# Altium footprint library iMX6 Rex Development Baseboard V1I1_PCB.PcbLib: 77 footprints (part 3 of 5)
Each footprint in its own frame and in the unit in brackets; x right, y up, seen from the top. Pads: shape width x height; smd on the part's side, far side on the other; paste and mask are expansions set on the pad; w line width, h text height; cw(c..) or ccw(c..) is an arc to the next point about the centre after c.
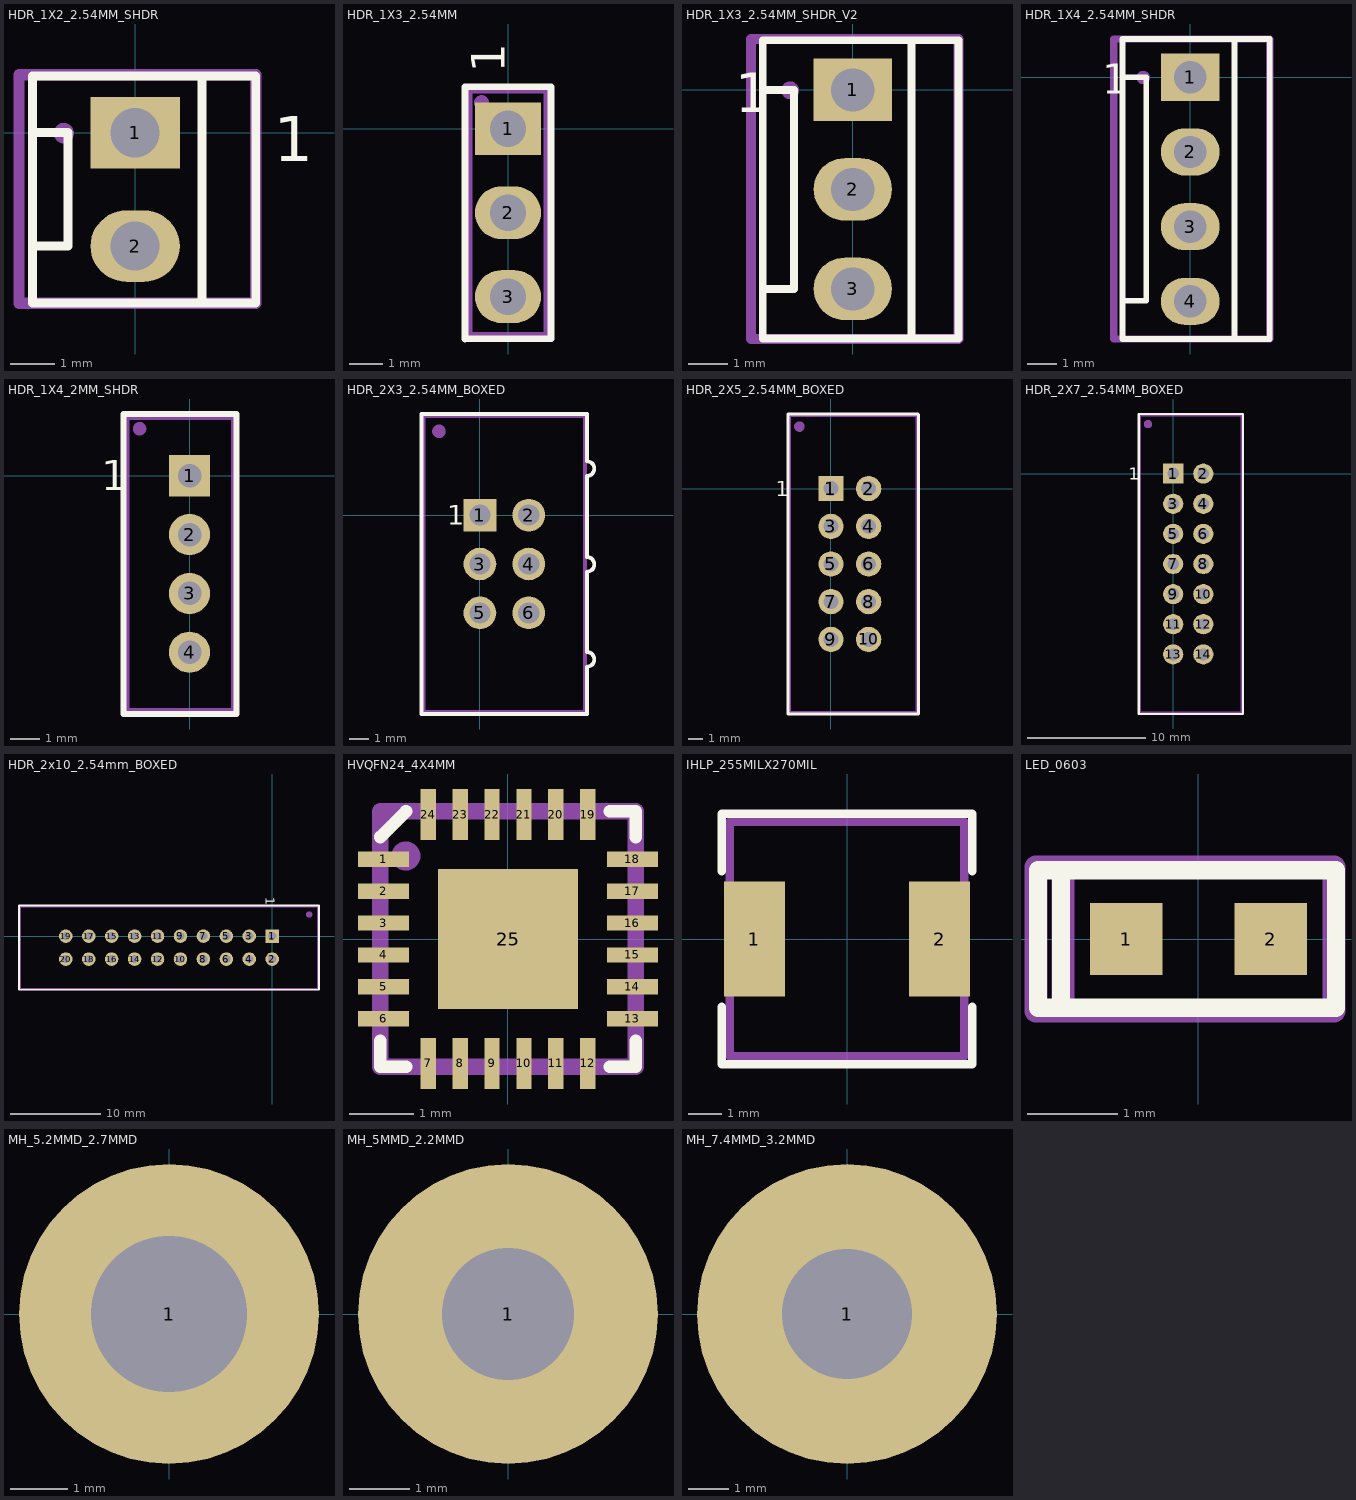
[diagram p2: the footprints below, top view; thin cyan lines are the x and y axes]

## HDR_1X2_2.54MM_SHDR [mm]
pads (2):
  rect 2x1.6 hole 1.1: 1(0,0)
  oval 2x1.6 hole 1.1: 2(0,-2.54)
Top Overlay:
  lines w0.2: -2.3,-2.54 -1.5,-2.54 -1.5,0 -2.3,0 ; 1.5,-3.8 1.5,1.27 ; -2.3,-3.81 2.7,-3.81 2.7,1.27 -2.3,1.27 -2.3,-3.81
  text "1" at 3.1,-0.64 h1.02
Mechanical 16:
  circle w0.254: c-1.6,-0.01 r0.1
  lines w0.254: -2.6,-3.82 2.7,-3.82 2.7,1.3 -2.6,1.3 -2.6,-3.82
Mechanical 29:
  text ".Designator" at 0.5,-2.34 h1
3D body "76384-302LFc.stp": height 9.34, standoff -3.43, extent -2.6,-3.31 2.649,0.77

## HDR_1X3_2.54MM [mm]
pads (3):
  rect 2x1.6 hole 1.1: 1(0,0)
  oval 2x1.6 hole 1.1: 2(0,-2.54) 3(0,-5.08)
Top Overlay:
  lines w0.2: -1.3,-6.36 -1.3,1.27 1.3,1.27 1.3,-6.3 ; -1.3,-6.35 1.3,-6.35
  text "1" at -0.1,1.7 h1.02
Mechanical 16:
  circle w0.254: c-0.8,0.79 r0.1
  lines w0.254: -1.2,-6.27 -1.2,1.19 1.2,1.19 1.2,-6.27 -1.2,-6.27
Mechanical 29:
  text ".Designator" at 0.8,-4.5 h1.52
3D body "77311-y18-03_asm.stp": height 8.4, standoff -3.1, extent -1.2,-6.15 1.21,1.07

## HDR_1X3_2.54MM_SHDR_V2 [mm]
pads (3):
  rect 2x1.6 hole 1.1: 1(0,0)
  oval 2x1.6 hole 1.1: 2(0,-2.54) 3(0,-5.08)
Top Overlay:
  lines w0.2: -2.3,-5.08 -1.5,-5.08 -1.5,0 -2.3,0 ; 1.5,-6.35 1.5,1.27 ; -2.3,-6.35 -2.3,1.27 2.7,1.27 2.7,-6.35 -2.3,-6.35
  text "1" at -2.994,-0.57 h1.02
Mechanical 16:
  circle w0.254: c-1.6,-0.01 r0.1
  lines w0.254: -2.6,-6.36 2.7,-6.36 2.7,1.3 -2.6,1.3 -2.6,-6.36
Mechanical 29:
  text ".Designator" at -0.6,-0.9 h1.52
3D body "76384-303LFc.stp": height 9.34, standoff -3.43, extent -2.6,-5.85 2.649,0.77

## HDR_1X4_2.54MM_SHDR [mm]
pads (4):
  rect 2x1.6 hole 1.1: 1(0,0)
  oval 2x1.6 hole 1.1: 2(0,-2.54) 3(0,-5.08) 4(0,-7.62)
Top Overlay:
  lines w0.2: -2.3,-7.6 -1.5,-7.6 -1.5,0 -2.3,0 ; 1.5,-8.9 1.5,1.3 ; -2.3,-8.9 2.7,-8.9 2.7,1.3 -2.3,1.3 -2.3,-8.9
  text "1" at -2.994,-0.57 h1.02
Mechanical 16:
  circle w0.254: c-1.6,-0.01 r0.1
  lines w0.254: -2.6,-8.9 -2.6,1.3 2.7,1.3 2.7,-8.9 -2.6,-8.9
Mechanical 29:
  text ".Designator" at -1,-1.84 h1.52
3D body "76384-304lf.stp": height 9.34, standoff -3.43, extent -2.6,-8.39 2.649,0.77

## HDR_1X4_2MM_SHDR [mm]
pads (4):
  rect 1.4x1.4 hole 0.8: 1(0,0)
  round 1.4 hole 0.8: 2(0,-2) 3(0,-4) 4(0,-6)
Top Overlay:
  lines w0.2: -2.25,-8.1 1.6,-8.1 1.6,2.1 -2.25,2.1 -2.25,-8.1
  text "1" at -3,-0.5 h1.02
Mechanical 16:
  circle w0.254: c-1.7,1.6 r0.1
  lines w0.2: -2.15,-8 -2.15,2 1.5,2 1.5,-8 -2.15,-8
Mechanical 29:
  text ".Designator" at 0.5,-5.2 h1.52
3D body "532530470.stp": height 5.55, standoff -3.45, extent -2.15,-8 1.5,2

## HDR_2X3_2.54MM_BOXED [mm]
pads (6):
  rect 1.7x1.7 hole 1.1: 1(0,0)
  round 1.7 hole 1.1: 2(2.54,0) 3(0,-2.54) 4(2.54,-2.54) 5(0,-5.08) 6(2.54,-5.08)
Top Overlay:
  lines w0.2: 5.57,-10.34 -3.03,-10.34 -3.03,5.26 5.57,5.26 5.57,2.8 cw(c5.57,2.42) 5.57,2.04 5.57,-2.18 cw(c5.57,-2.56) 5.57,-2.94 5.57,-7.12 cw(c5.57,-7.5) 5.57,-7.88 5.57,-10.3
  text "1" at -1.7,-0.5 h1.02
Mechanical 16:
  circle w0.5: c-2.13,4.36 r0.1
  lines w0.2: -2.93,-10.24 -2.93,5.16 5.47,5.16 5.47,-10.24 -2.93,-10.24
Mechanical 29:
  text ".Designator" at 2,-4.5 h1.52
3D body "30306-6002.stp": height 8.89, standoff -3.17, extent -2.931,-10.155 5.883,5.06

## HDR_2X5_2.54MM_BOXED [mm]
pads (10):
  rect 1.7x1.7 hole 1: 1(0,0)
  round 1.7 hole 1: 2(2.54,0) 3(0,-2.54) 4(2.54,-2.54) 5(0,-5.08) 6(2.54,-5.08) 7(0,-7.62) 8(2.54,-7.62) 9(0,-10.16) 10(2.54,-10.16)
Top Overlay:
  lines w0.2: -2.9,-15.19 5.89,-15.19 5.89,5 5.86,5.03 -2.9,5.03 -2.9,-15.19
  text "1" at -3.73,-0.53 h1.02
Mechanical 16:
  circle w0.5: c-2.13,4.18 r0.1
  lines w0.2: -2.8,-15.09 5.79,-15.09 5.79,4.93 -2.8,4.93 -2.8,-15.09
Mechanical 29:
  text ".Designator" at 2,-7 h1.52
3D body "30310-6002.stp": height 8.89, standoff -3.17, extent -2.906,-15.22 5.908,5.075

## HDR_2X7_2.54MM_BOXED [mm]
pads (14):
  rect 1.7x1.7 hole 1: 1(0,0)
  round 1.7 hole 1: 2(2.54,0) 3(0,-2.54) 4(2.54,-2.54) 5(0,-5.08) 6(2.54,-5.08) 7(0,-7.62) 8(2.54,-7.62) 9(0,-10.16) 10(2.54,-10.16) 11(0,-12.7) 12(2.54,-12.7) 13(0,-15.24) 14(2.54,-15.24)
Top Overlay:
  lines w0.2: -2.9,-20.27 5.89,-20.27 5.89,5.03 -2.9,5.03 -2.9,-20.27
  text "1" at -3.73,-0.53 h1.02
Mechanical 16:
  circle w0.5: c-2.13,4.18 r0.1
  lines w0.2: -2.8,-20.17 5.79,-20.17 5.79,4.93 -2.8,4.93 -2.8,-20.17
Mechanical 29:
  text ".Designator" at 2,-9.5 h1.52
3D body "30314-6002.stp": height 8.89, standoff -3.17, extent -2.91,-20.312 5.904,5.062

## HDR_2x10_2.54mm_BOXED [mm]
pads (20):
  rect 1.5x1.5 hole 0.9: 1(0,0)
  round 1.5 hole 0.9: 2(0,-2.54) 3(-2.54,0) 4(-2.54,-2.54) 5(-5.08,0) 6(-5.08,-2.54) 7(-7.62,0) 8(-7.62,-2.54) 9(-10.16,0) 10(-10.16,-2.54) 11(-12.7,0) 12(-12.7,-2.54) 13(-15.24,0) 14(-15.24,-2.54) 15(-17.78,0) 16(-17.78,-2.54) 17(-20.32,0) 18(-20.32,-2.54) 19(-22.86,0) 20(-22.86,-2.54)
Top Overlay:
  lines w0.2: -28.04,-5.942 5.18,-5.942 5.18,3.4 5.178,3.402 -28.04,3.402 -28.04,-5.942
  text "1" at -0.7,4.3 h1.02
Mechanical 16:
  circle w0.5: c4.1,2.4 r0.1
  lines w0.2: -27.94,-5.842 5.08,-5.842 5.08,3.302 -27.94,3.302 -27.94,-5.842
Mechanical 29:
  text ".Designator" at -13.5,-2 h1.52
3D body "c-5103308-5-b-3d.stp": height 9.9, standoff -3, extent -27.935,-5.847 5.085,3.297

## HVQFN24_4X4MM [mm]
pads (25):
  rect 0.8x0.24 smd mask+0.025: 1(-1.95,1.25) 2(-1.95,0.75) 3(-1.95,0.25) 4(-1.95,-0.25) 5(-1.95,-0.75) 6(-1.95,-1.25) 13(1.95,-1.25) 14(1.95,-0.75) 15(1.95,-0.25) 16(1.95,0.25) 17(1.95,0.75) 18(1.95,1.25)
  rect 0.24x0.8 smd mask+0.025: 7(-1.25,-1.95) 8(-0.75,-1.95) 9(-0.25,-1.95) 10(0.25,-1.95) 11(0.75,-1.95) 12(1.25,-1.95) 19(1.25,1.95) 20(0.75,1.95) 21(0.25,1.95) 22(-0.25,1.95) 23(-0.75,1.95) 24(-1.25,1.95)
  rect 2.2x2.2 smd mask+0.025: 25(0,0)
Top Overlay:
  lines w0.2: -2,-1.6 -2,-2 -1.6,-2 ; -2,1.6 -1.6,2 ; 1.6,-2 2,-2 2,-1.6 ; 1.6,2 2,2 2,1.6
Mechanical 16:
  circle w0.254: c-1.6,1.3 r0.1
  lines w0.254: -2,-2 -2,2 2,2 2,-2 -2,-2
Mechanical 29:
  text ".Designator" at -0.2,0.7 h0.6
3D body: height 1, standoff 0, extent -2,-2 2,2

## IHLP_255MILX270MIL [mil]
pads (2):
  rect 72x135 smd: 1(-109,0) 2(109,0)
Top Overlay:
  lines w10: -147.64,-80 -147.64,-147.64 147.64,-147.64 147.64,-80 ; -147.64,80 -147.64,147.64 147.64,147.64 147.64,80
Mechanical 16:
  lines w10: -137.8,-137.8 -137.8,137.8 137.8,137.8 137.8,-137.8 -137.8,-137.8
Mechanical 29:
  text ".Designator" at -43.31,-27.56 h60
3D body: height 78.74, standoff 0, extent 119.34,-62.92 135.09,63.06
3D body: height 78.74, standoff 0, extent -134.93,-62.92 -119.18,63.07
3D body: height 118.11, standoff 0, extent -119.25,-106.42 -95.53,106.57
3D body: height 118.11, standoff 0, extent 95.63,-106.43 119.34,106.57
3D body: height 118.11, standoff 0, extent 72.2,-130 119.25,-82.85
3D body: height 118.11, standoff 0, extent 72.19,82.95 119.34,130.01
3D body: height 118.11, standoff 0, extent -119.25,82.94 -72.1,130
3D body: height 118.11, standoff 0, extent -119.25,-130 -72.19,-82.85
3D body: height 118.11, standoff 0, extent -95.72,-130 95.77,130.01

## IMX6 REX MODULE 3D [mm]
3D body "iMX6 Rex_V1I1_PCB(Prototype) - 18-OCT-2013.step": height 9.6, standoff 1.61, extent 0,0 70,40

## LED_0603 [mm]
pads (2):
  rect 0.8x0.8 smd: 1(-0.8,0) 2(0.8,0)
Top Overlay:
  lines w0.2: -1.524,-0.762 -1.524,0.762 ; -1.778,-0.762 1.524,-0.762 1.524,0.762 -1.778,0.762 -1.778,-0.762
Mechanical 16:
  lines w0.254: -1.5,-0.8 -1.5,0.8 ; -1.8,-0.8 -1.8,0.8 1.5,0.8 1.5,-0.8 -1.8,-0.8
Mechanical 29:
  text ".Designator" at 0.4,0.3 h0.6
3D body "LED SMD 0603.step": height 0.65, standoff 0, extent -0.85,-0.4 0.85,0.4
3D body: height 0.66, standoff 0.5, extent -0.2,-0.2 0.2,0.2

## MH_5.2MMD_2.7MMD [mm]
pads (1):
  round 5.2 / inner round 3.683 / far side round 5.2 hole 2.7: 1(0,0)

## MH_5MMD_2.2MMD [mm]
pads (1):
  round 5 / inner round 3.683 / far side round 5 hole 2.2: 1(0,0)

## MH_7.4MMD_3.2MMD [mm]
pads (1):
  round 7.4 / inner round 3.683 / far side round 7.4 hole 3.2 mask+0.025: 1(0,0)